# Altium schematic symbol library ISOW1432DFMR.SchLib: 1 symbol
Pins are listed as number, name and electrical type; pins without a type are passive.

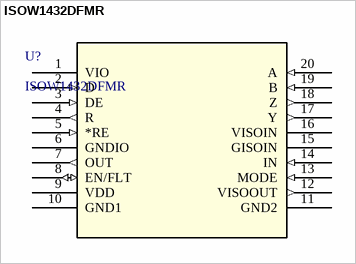
[diagram p0: symbol ISOW1432DFMR]

## ISOW1432DFMR
designator U?
Low emissions, 5-kVrms, 12-Mbps isolated RS-485 transceiver with integrated DC/DC converter 20-SOIC -40 to 125; Manufacturer_Name: Texas Instruments; Type: Digital Isolators; Copyright: Copyright (C) 2026 Ultra Librarian. All rights reserved.; Manufacturer_Part_Number: ISOW1432DFMR; RefDes: RefDes
footprint SOIC_2DFM_TEX
pins: 1 VIO (power), 2 D (in), 3 DE (in), 4 R (out), 5 *RE (in), 6 GNDIO (power), 7 OUT (out), 8 EN/FLT (io), 9 VDD (power), 10 GND1 (power), 11 GND2 (power), 12 VISOOUT (out), 13 MODE (in), 14 IN (in), 15 GISOIN (power), 16 VISOIN (power), 17 Y (out), 18 Z (out), 19 B (in), 20 A (in)